# EAGLE library part V92-MODEM (library xport-v92-faxcard)
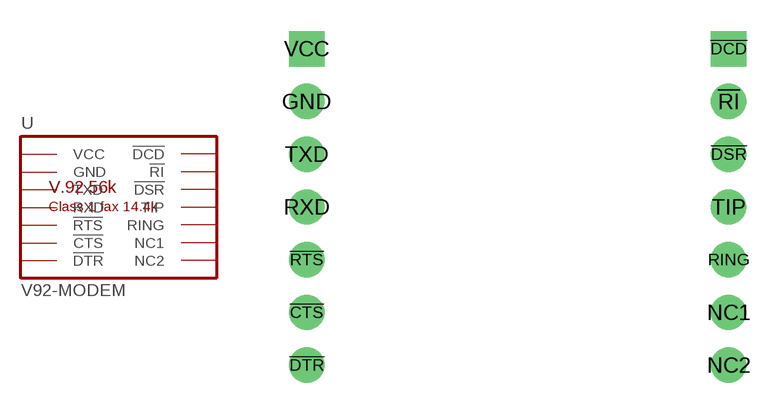
[diagram p2: symbol with the pads of V92MOD; footprint V92MOD]

Designator prefix U

## V92-MODEM  [V92MOD]
!CTS  !CTS
!DCD  !DCD
!DSR  !DSR
!DTR  !DTR
!RI  !RI
!RTS  !RTS
GND  GND
NC1  NC1
NC2  NC2
RING  RING
RXD  RXD
TIP  TIP
TXD  TXD
VCC  VCC

## Footprint V92MOD (pad centres in mm)
V.92/56k controller-based data+fax modem module, 25.4 mm sq, serial TTL 3.3 V, DAA on board
drill 1 pad 1.7: !CTS -10.16,-5.08; !DSR 10.16,2.54; !DTR -10.16,-7.62; !RI 10.16,5.08; !RTS -10.16,-2.54; GND -10.16,5.08; NC1 10.16,-5.08; NC2 10.16,-7.62; RING 10.16,-2.54; RXD -10.16,0; TIP 10.16,0; TXD -10.16,2.54
drill 1 pad 1.7 square: !DCD 10.16,7.62; VCC -10.16,7.62